# Altium footprint library Tony_.PcbLib: 94 footprints (part 3 of 6)
Each footprint in its own frame and in the unit in brackets; x right, y up, seen from the top. Pads: shape width x height; smd on the part's side, far side on the other; paste and mask are expansions set on the pad; w line width, h text height; cw(c..) or ccw(c..) is an arc to the next point about the centre after c.
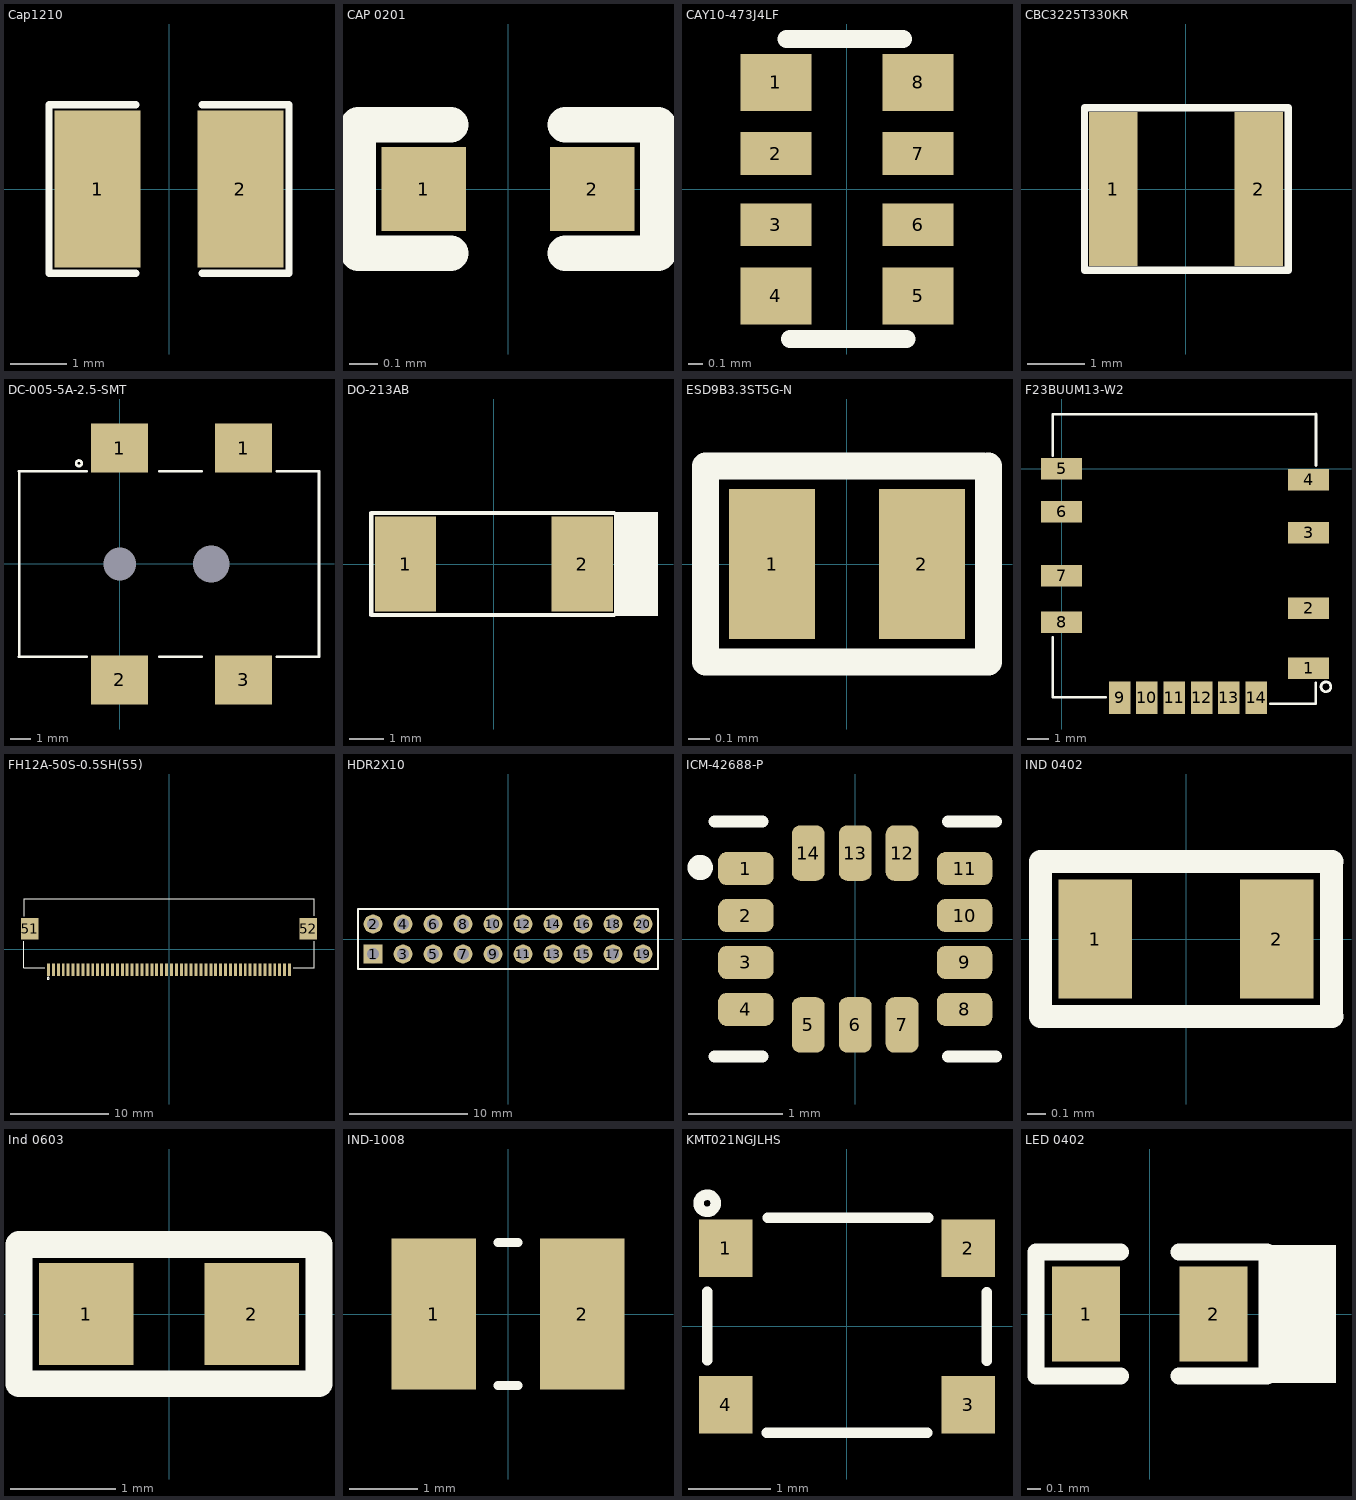
[diagram p2: the footprints below, top view; thin cyan lines are the x and y axes]

## Cap1210 [mil] "SMD 1210"
pads (2):
  rect 60x110 smd: 1(-50,0) 2(50,0)
Top Overlay:
  lines w5: -23,-59 -84,-59 -84,59 -23,59 ; 23,-59 84,-59 84,59 23,59
3D body "User Library-CAPC3225X10.step": height 39.37, standoff 0, extent -62.99,-49.21 63,49.22

## CAP 0201 [mm]
pads (2):
  rect 0.3x0.3 smd mask+0.055: 1(-0.3,0) 2(0.3,0)
Top Overlay:
  lines w0.127: -0.203,-0.229 -0.533,-0.229 -0.533,0.229 -0.203,0.229 ; 0.203,-0.229 0.533,-0.229 0.533,0.229 0.203,0.229
3D body "User Library-SMD Ceramic Capacitors_0201 (0603)_AB.STEP": height 0.28, standoff -0.02, extent -0.3,-0.15 0.301,0.15

## CAY10-473J4LF [mm] "RES ARRAY 4 RES 47K OHM 0804"
pads (8):
  rect 0.5x0.4 smd: 1(-0.5,0.75) 4(-0.5,-0.75) 5(0.5,-0.75) 8(0.5,0.75)
  rect 0.5x0.3 smd: 2(-0.5,0.25) 3(-0.5,-0.25) 6(0.5,-0.25) 7(0.5,0.25)
Top Overlay:
  lines w0.127: -0.424,1.055 0.394,1.055 ; -0.401,-1.053 0.417,-1.053
3D body "cay10-473j4lf.stp": height 0.33, standoff -0.02, extent -0.492,-1 0.508,1

## CBC3225T330KR [mm] "1210 Inductors (SMD) ROHS"
pads (2):
  rect 0.85x2.7 smd: 1(-1.275,0) 2(1.275,0)
Top Overlay:
  lines w0.127: -1.778,-1.422 1.79,-1.422 1.79,1.422 -1.778,1.422 -1.778,-1.422
3D body "CBC3225T330KR.STEP": height 2.7, standoff 0, extent -1.6,-1.25 1.6,1.25

## DC-005-5A-2.5-SMT [mm]
pads (6):
  rect 2.8x2.4 smd: 1(0,5.7) 1(6.1,5.7) 2(0,-5.7) 3(6.1,-5.7)
  round 0 hole 1.6 unplated: MH1(0,0)
  round 0 hole 1.8 unplated: MH2(4.5,0)
Top Overlay:
  circle w0.127: c-2.007,4.953 r0.139
  lines w0.127: -4.953,-4.557 -1.626,-4.557 ; -4.953,4.557 -1.626,4.557 ; -4.949,-4.557 -4.949,4.557 ; 1.956,-4.557 4.035,-4.557 ; 1.956,4.557 4.035,4.557 ; 7.726,-4.557 9.804,-4.557 9.805,4.557 7.726,4.557
3D body "CUI-PJ-002A-SMT.step": height 11.17, standoff -1.03, extent -4.987,-6.274 9.813,6.326

## DO-213AB [mm]
pads (2):
  rect 1.8x2.8 smd: 1(-2.6,0) 2(2.6,0)
Top Overlay:
  rectangle: 3.531,-1.524 4.826,1.524
  lines w0.127: 3.531,-1.499 -3.607,-1.499 -3.607,1.499 3.531,1.499
3D body "User Library-Vishay - MELF DO-213AB.step": height 2.64, standoff -0.04, extent -2.6,-1.346 2.6,1.324

## ESD9B3.3ST5G-N [mm] "TVS DIODE Bidirectional 3.3V (Max) 3.8V 8V 10A SOD923"
pads (2):
  rect 0.4x0.7 smd: 1(-0.35,0) 2(0.35,0)
Top Overlay:
  lines w0.127: 0.635,0.457 -0.66,0.457 -0.66,-0.457 0.66,-0.457 0.66,0.457
3D body "User Library-SOD-882D.step": height 0.43, standoff -0.04, extent -0.525,-0.325 0.525,0.325

## F23BUUM13-W2 [mm] "Wifi+BLE module"
pads (14):
  rect 1.9x1 smd: 1(11.49,-9.28) 2(11.49,-6.48) 3(11.49,-2.98) 4(11.49,-0.5) 5(0,0) 6(0,-2) 7(0,-4.98) 8(0,-7.14)
  rect 1x1.5 smd: 9(2.7,-10.65) 10(3.97,-10.65) 11(5.24,-10.65) 12(6.51,-10.65) 13(7.78,-10.65) 14(9.05,-10.65)
Top Overlay:
  circle w0.127: c12.294,-10.135 r0.229
  lines w0.127: -0.406,-7.842 -0.406,-10.617 2.057,-10.617 ; -0.406,0.625 -0.406,2.525 ; -0.405,2.54 11.785,2.54 ; 9.703,-10.922 11.824,-10.922 11.824,-9.957 ; 11.836,0.152 11.836,2.552

## FH12A-50S-0.5SH(55) [mm] "50 0.020\"(0.50mm) 0.079\"(2.00mm) Forward Slip Contact,Top SMD FFC, FPC Connectors ROHS"
pads (52):
  rect 0.3x1.3 smd: 1(-12.25,-2.087) 2(-11.75,-2.087) 3(-11.25,-2.087) 4(-10.75,-2.087) 5(-10.25,-2.087) 6(-9.75,-2.087) 7(-9.25,-2.087) 8(-8.75,-2.087) 9(-8.25,-2.087) 10(-7.75,-2.087) 11(-7.25,-2.087) 12(-6.75,-2.087) 13(-6.25,-2.087) 14(-5.75,-2.087) 15(-5.25,-2.087) 16(-4.75,-2.087) 17(-4.25,-2.087) 18(-3.75,-2.087) 19(-3.25,-2.087) 20(-2.75,-2.087) 21(-2.25,-2.087) 22(-1.75,-2.087) 23(-1.25,-2.087) 24(-0.75,-2.087) 25(-0.25,-2.087) 26(0.25,-2.087) 27(0.75,-2.087) 28(1.25,-2.087) 29(1.75,-2.087) 30(2.25,-2.087) 31(2.75,-2.087) 32(3.25,-2.087) 33(3.75,-2.087) 34(4.25,-2.087) 35(4.75,-2.087) 36(5.25,-2.087) 37(5.75,-2.087) 38(6.25,-2.087) 39(6.75,-2.087) 40(7.25,-2.087) 41(7.75,-2.087) 42(8.25,-2.087) 43(8.75,-2.087) 44(9.25,-2.087) 45(9.75,-2.087) 46(10.25,-2.087) 47(10.75,-2.087) 48(11.25,-2.087) 49(11.75,-2.087) 50(12.25,-2.087)
  rect 1.8x2.2 smd: 51(-14.15,2.088) 52(14.15,2.088)
Top Overlay:
  circle w0.127: c-12.294,-2.972 r0.102
  lines w0.127: -14.757,0.787 -14.757,-1.905 -12.649,-1.905 ; -14.732,3.364 -14.732,5.131 14.783,5.131 14.783,3.389 ; 12.649,-1.88 14.757,-1.88 14.757,0.813
3D body "FH12A-50S-0.5SH.stp": height 2.05, standoff -0.1, extent -14.75,-1.854 14.75,5.146

## HDR2X10 [mm] "Connector; Header; 10x2 Position"
pads (20):
  rect 1.6x1.6 hole 1: 1(-11.43,-1.27)
  round 1.6 hole 1: 2(-11.43,1.27) 3(-8.89,-1.27) 4(-8.89,1.27) 5(-6.35,-1.27) 6(-6.35,1.27) 7(-3.81,-1.27) 8(-3.81,1.27) 9(-1.27,-1.27) 10(-1.27,1.27) 11(1.27,-1.27) 12(1.27,1.27) 13(3.81,-1.27) 14(3.81,1.27) 15(6.35,-1.27) 16(6.35,1.27) 17(8.89,-1.27) 18(8.89,1.27) 19(11.43,-1.27) 20(11.43,1.27)
Top Overlay:
  lines w0.2: -12.7,-2.54 -10.795,-2.54 12.7,-2.54 12.7,2.54 -10.795,2.54 -12.7,2.54 -12.7,-2.54
3D body "m20-9761046_asm.stp": height 8.8, standoff -2.68, extent -12.624,-2.54 12.776,2.54

## ICM-42688-P [mm]
pads (14):
  rrect50% 0.59x0.35 smd mask+0: 1(-1.165,0.75) 2(-1.165,0.25) 3(-1.165,-0.25) 4(-1.165,-0.75) 8(1.165,-0.75) 9(1.165,-0.25) 10(1.165,0.25) 11(1.165,0.75)
  rrect50% 0.35x0.59 smd mask+0: 5(-0.5,-0.915) 6(0,-0.915) 7(0.5,-0.915) 12(0.5,0.915) 13(0,0.915) 14(-0.5,0.915)
Top Overlay:
  circle w0.2: c-1.651,0.762 r0.034
  lines w0.127: -1.5,-1.25 -0.99,-1.25 ; -1.5,1.25 -0.99,1.25 ; 0.99,-1.25 1.5,-1.25 ; 0.99,1.25 1.5,1.25
Top Solder:
  drawing of 14 lines, arcs and shapes, not listed
3D body "ICM-42688-P--3DModel-STEP-1.STEP": height 0.89, standoff -0.08, extent -1.5,-1.25 1.5,1.25

## IND 0402 [mm]
pads (2):
  rect 0.41x0.66 smd: 1(-0.505,0) 2(0.505,0)
Top Overlay:
  lines w0.127: 0.81,-0.432 0.81,0.432 ; 0.813,-0.432 -0.81,-0.432 -0.81,0.432 0.813,0.432
3D body "L-W15AN1N3D10D--3DModel-STEP-231308 (1).STEP": height 0.6, standoff 0, extent -0.5,-0.3 0.5,0.3

## Ind 0603 [mm]
pads (2):
  rect 0.9x0.97 smd: 1(-0.785,0) 2(0.785,0)
Top Overlay:
  lines w0.254: -1.422,-0.66 1.422,-0.66 1.422,0.66 -1.422,0.66 -1.422,-0.66
3D body "45630.stp": height 0.76, standoff -0.04, extent -0.8,-0.4 0.8,0.4

## IND-1008 [mm]
pads (2):
  rect 1.24x2.22 smd: 1(-1.09,0) 2(1.09,0)
Top Overlay:
  lines w0.127: -0.15,-1.049 0.15,-1.049 ; -0.15,1.049 0.15,1.049
3D body "LQM2HPN1R0MJ0L.STEP": height 1.2, standoff 0, extent -1.25,-1 1.25,1

## KMT021NGJLHS [mm] "Tactile Switches Ultra-LW Tact SW SMT SPNOFa 1.6N HF"
pads (4):
  rect 0.65x0.7 smd: 1(-1.475,0.95) 2(1.475,0.95) 3(1.475,-0.95) 4(-1.475,-0.95)
Top Overlay:
  circle w0.127: c-1.702,1.499 r0.105
  lines w0.127: -1.702,-0.413 -1.702,0.421 ; -0.978,-1.295 0.978,-1.295 ; -0.965,1.321 0.991,1.321 ; 1.702,-0.417 1.702,0.417
3D body "KMT021NGJLHS.stp": height 0.63, standoff -0.05, extent -1.698,-1.3 1.698,1.3

## LED 0402 [mm] "LED BLUE CLEAR CHIP SMD"
pads (2):
  rect 0.5x0.7 smd: 1(-0.47,0) 2(0.47,0)
Top Overlay:
  rectangle: 0.864,-0.508 1.372,0.508
  lines w0.127: -0.216,-0.457 -0.838,-0.457 -0.838,0.457 -0.216,0.457 ; 0.216,-0.457 0.864,-0.457 0.864,0.457 0.216,0.457
3D body "APHHS1005.STEP": height 0.5, standoff 0, extent -0.5,-0.25 0.5,0.25